# Altium footprint library W5500.PcbLib: 3 footprints
Each footprint in its own frame and in the unit in brackets; x right, y up, seen from the top. Pads: shape width x height; smd on the part's side, far side on the other; paste and mask are expansions set on the pad; w line width, h text height; cw(c..) or ccw(c..) is an arc to the next point about the centre after c.
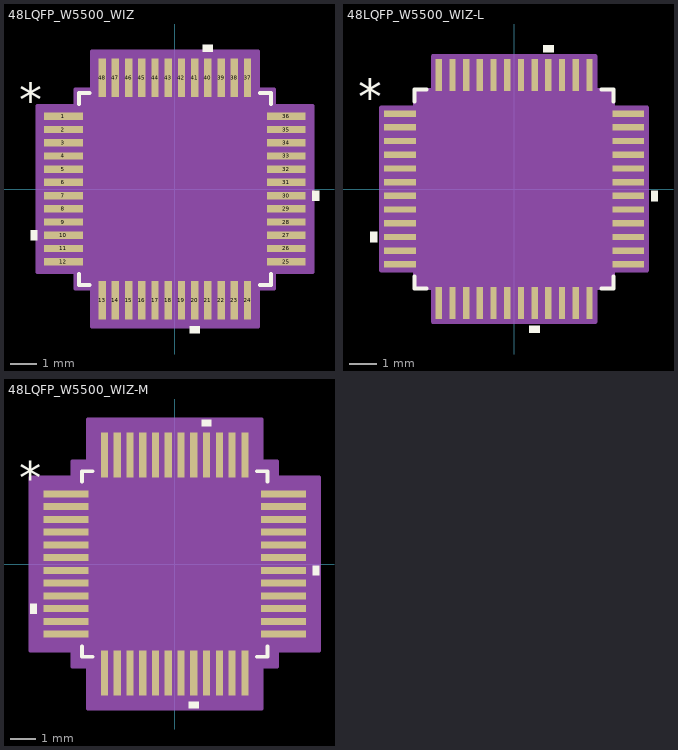
[diagram p0: the footprints below, top view; thin cyan lines are the x and y axes]

## 48LQFP_W5500_WIZ [mil]
pads (48):
  rect 57.56x11 smd paste+0 mask+0: 1(-166,108.27) 2(-166,88.58) 3(-166,68.9) 4(-166,49.21) 5(-166,29.53) 6(-166,9.84) 7(-166,-9.84) 8(-166,-29.53) 9(-166,-49.21) 10(-166,-68.9) 11(-166,-88.58) 12(-166,-108.27) 25(166,-108.27) 26(166,-88.58) 27(166,-68.9) 28(166,-49.21) 29(166,-29.53) 30(166,-9.84) 31(166,9.84) 32(166,29.53) 33(166,49.21) 34(166,68.9) 35(166,88.58) 36(166,108.27)
  rect 11x57.56 smd paste+0 mask+0: 13(-108.27,-166) 14(-88.58,-166) 15(-68.9,-166) 16(-49.21,-166) 17(-29.53,-166) 18(-9.84,-166) 19(9.84,-166) 20(29.53,-166) 21(49.21,-166) 22(68.9,-166) 23(88.58,-166) 24(108.27,-166) 37(108.27,166) 38(88.58,166) 39(68.9,166) 40(49.21,166) 41(29.53,166) 42(9.84,166) 43(-9.84,166) 44(-29.53,166) 45(-49.21,166) 46(-68.9,166) 47(-88.58,166) 48(-108.27,166)
Top Overlay:
  region: -204.78,-61.4 -214.78,-61.4 -214.78,-76.4 -204.78,-76.4
  region: 37.03,-204.78 22.03,-204.78 22.03,-214.78 37.03,-214.78
  region: 204.78,-2.34 214.78,-2.34 214.78,-17.34 204.78,-17.34
  region: 56.71,204.78 41.71,204.78 41.71,214.78 56.71,214.78
  lines w6: -143,-126.87 -143,-143 -126.87,-143 ; -143,126.87 -143,143 -126.87,143 ; 126.87,-143 143,-143 143,-126.87 ; 126.87,143 143,143 143,126.87
  text "*" at -232.28,108.11 h50
  text ".Designator" at -137.5,-25 h50
Mechanical 13:
  drawing of 197 lines, arcs and shapes, not listed
  text ".Designator" at -137.5,-25 h50
  text "*" at -135.5,93.11 h50
Mechanical 15:
  region: -123.77,-148 -148,-148 -148,-123.77 -204.78,-123.77 -204.78,123.77 -148,123.77 -148,148 -123.77,148 -123.77,204.78 123.77,204.78 123.77,148 148,148 148,123.77 204.78,123.77 204.78,-123.77 148,-123.77 148,-148 123.77,-148 123.77,-204.78 -123.77,-204.78
  lines w6: -204.78,-123.77 -148,-123.77 -148,-148 -123.77,-148 -123.77,-204.78 123.77,-204.78 123.77,-148 148,-148 148,-123.77 204.78,-123.77 204.78,123.77 148,123.77 148,148 123.77,148 123.77,204.78 -123.77,204.78 -123.77,148 -148,148 -148,123.77 -204.78,123.77 -204.78,-123.77
3D body "48LQFP_W5500_WIZ.step": height 63.11, standoff 0, extent -180.98,-180.98 180.98,180.98

## 48LQFP_W5500_WIZ-L [mm]
pads (48):
  rect 1.162x0.229 smd paste+0 mask+0: 1(-4.166,2.75) 2(-4.166,2.25) 3(-4.166,1.75) 4(-4.166,1.25) 5(-4.166,0.75) 6(-4.166,0.25) 7(-4.166,-0.25) 8(-4.166,-0.75) 9(-4.166,-1.25) 10(-4.166,-1.75) 11(-4.166,-2.25) 12(-4.166,-2.75) 25(4.166,-2.75) 26(4.166,-2.25) 27(4.166,-1.75) 28(4.166,-1.25) 29(4.166,-0.75) 30(4.166,-0.25) 31(4.166,0.25) 32(4.166,0.75) 33(4.166,1.25) 34(4.166,1.75) 35(4.166,2.25) 36(4.166,2.75)
  rect 0.229x1.162 smd paste+0 mask+0: 13(-2.75,-4.166) 14(-2.25,-4.166) 15(-1.75,-4.166) 16(-1.25,-4.166) 17(-0.75,-4.166) 18(-0.25,-4.166) 19(0.25,-4.166) 20(0.75,-4.166) 21(1.25,-4.166) 22(1.75,-4.166) 23(2.25,-4.166) 24(2.75,-4.166) 37(2.75,4.166) 38(2.25,4.166) 39(1.75,4.166) 40(1.25,4.166) 41(0.75,4.166) 42(0.25,4.166) 43(-0.25,4.166) 44(-0.75,4.166) 45(-1.25,4.166) 46(-1.75,4.166) 47(-2.25,4.166) 48(-2.75,4.166)
Top Overlay:
  region: -5.001,-1.559 -5.255,-1.559 -5.255,-1.94 -5.001,-1.94
  region: 0.941,-5.001 0.56,-5.001 0.56,-5.255 0.941,-5.255
  region: 5.001,-0.059 5.255,-0.059 5.255,-0.44 5.001,-0.44
  region: 1.441,5.001 1.06,5.001 1.06,5.255 1.441,5.255
  lines w0.152: -3.632,-3.197 -3.632,-3.632 -3.197,-3.632 ; -3.632,3.197 -3.632,3.632 -3.197,3.632 ; 3.197,-3.632 3.632,-3.632 3.632,-3.197 ; 3.197,3.632 3.632,3.632 3.632,3.197
  text "*" at -5.7,2.746 h1.27
  text ".Designator" at -3.492,-0.635 h1.27
Mechanical 13:
  drawing of 197 lines, arcs and shapes, not listed
  text ".Designator" at -3.492,-0.635 h1.27
  text "*" at -3.442,2.365 h1.27
Mechanical 15:
  region: -2.966,-3.607 -3.607,-3.607 -3.607,-2.966 -4.849,-2.966 -4.849,2.966 -3.607,2.966 -3.607,3.607 -2.966,3.607 -2.966,4.849 2.966,4.849 2.966,3.607 3.607,3.607 3.607,2.966 4.849,2.966 4.849,-2.966 3.607,-2.966 3.607,-3.607 2.966,-3.607 2.966,-4.849 -2.966,-4.849
  lines w0.152: -4.849,-2.966 -3.607,-2.966 -3.607,-3.607 -2.966,-3.607 -2.966,-4.849 2.966,-4.849 2.966,-3.607 3.607,-3.607 3.607,-2.966 4.849,-2.966 4.849,2.966 3.607,2.966 3.607,3.607 2.966,3.607 2.966,4.849 -2.966,4.849 -2.966,3.607 -3.607,3.607 -3.607,2.966 -4.849,2.966 -4.849,-2.966
3D body "48LQFP_W5500_WIZ.step": height 1.6, standoff 0, extent -4.597,-4.597 4.597,4.597

## 48LQFP_W5500_WIZ-M [mm]
pads (48):
  rect 1.762x0.279 smd paste+0 mask+0: 1(-4.266,2.75) 2(-4.266,2.25) 3(-4.266,1.75) 4(-4.266,1.25) 5(-4.266,0.75) 6(-4.266,0.25) 7(-4.266,-0.25) 8(-4.266,-0.75) 9(-4.266,-1.25) 10(-4.266,-1.75) 11(-4.266,-2.25) 12(-4.266,-2.75) 25(4.266,-2.75) 26(4.266,-2.25) 27(4.266,-1.75) 28(4.266,-1.25) 29(4.266,-0.75) 30(4.266,-0.25) 31(4.266,0.25) 32(4.266,0.75) 33(4.266,1.25) 34(4.266,1.75) 35(4.266,2.25) 36(4.266,2.75)
  rect 0.279x1.762 smd paste+0 mask+0: 13(-2.75,-4.266) 14(-2.25,-4.266) 15(-1.75,-4.266) 16(-1.25,-4.266) 17(-0.75,-4.266) 18(-0.25,-4.266) 19(0.25,-4.266) 20(0.75,-4.266) 21(1.25,-4.266) 22(1.75,-4.266) 23(2.25,-4.266) 24(2.75,-4.266) 37(2.75,4.266) 38(2.25,4.266) 39(1.75,4.266) 40(1.25,4.266) 41(0.75,4.266) 42(0.25,4.266) 43(-0.25,4.266) 44(-0.75,4.266) 45(-1.25,4.266) 46(-1.75,4.266) 47(-2.25,4.266) 48(-2.75,4.266)
Top Overlay:
  region: -5.401,-1.559 -5.655,-1.559 -5.655,-1.94 -5.401,-1.94
  region: 0.941,-5.401 0.56,-5.401 0.56,-5.655 0.941,-5.655
  region: 5.401,-0.059 5.655,-0.059 5.655,-0.44 5.401,-0.44
  region: 1.441,5.401 1.06,5.401 1.06,5.655 1.441,5.655
  lines w0.152: -3.632,-3.222 -3.632,-3.632 -3.222,-3.632 ; -3.632,3.222 -3.632,3.632 -3.222,3.632 ; 3.222,-3.632 3.632,-3.632 3.632,-3.222 ; 3.222,3.632 3.632,3.632 3.632,3.222
  text "*" at -6.1,2.746 h1.27
  text ".Designator" at -3.492,-0.635 h1.27
Mechanical 13:
  drawing of 197 lines, arcs and shapes, not listed
  text ".Designator" at -3.492,-0.635 h1.27
  text "*" at -3.442,2.365 h1.27
Mechanical 15:
  region: -3.398,-4.013 -4.013,-4.013 -4.013,-3.398 -5.655,-3.398 -5.655,3.398 -4.013,3.398 -4.013,4.013 -3.398,4.013 -3.398,5.655 3.398,5.655 3.398,4.013 4.013,4.013 4.013,3.398 5.655,3.398 5.655,-3.398 4.013,-3.398 4.013,-4.013 3.398,-4.013 3.398,-5.655 -3.398,-5.655
  lines w0.152: -5.655,-3.398 -4.013,-3.398 -4.013,-4.013 -3.398,-4.013 -3.398,-5.655 3.398,-5.655 3.398,-4.013 4.013,-4.013 4.013,-3.398 5.655,-3.398 5.655,3.398 4.013,3.398 4.013,4.013 3.398,4.013 3.398,5.655 -3.398,5.655 -3.398,4.013 -4.013,4.013 -4.013,3.398 -5.655,3.398 -5.655,-3.398
3D body "48LQFP_W5500_WIZ.step": height 1.6, standoff 0, extent -4.597,-4.597 4.597,4.597